# Altium schematic symbol library Resistor.SchLib: 1085 symbols (part 3 of 29)
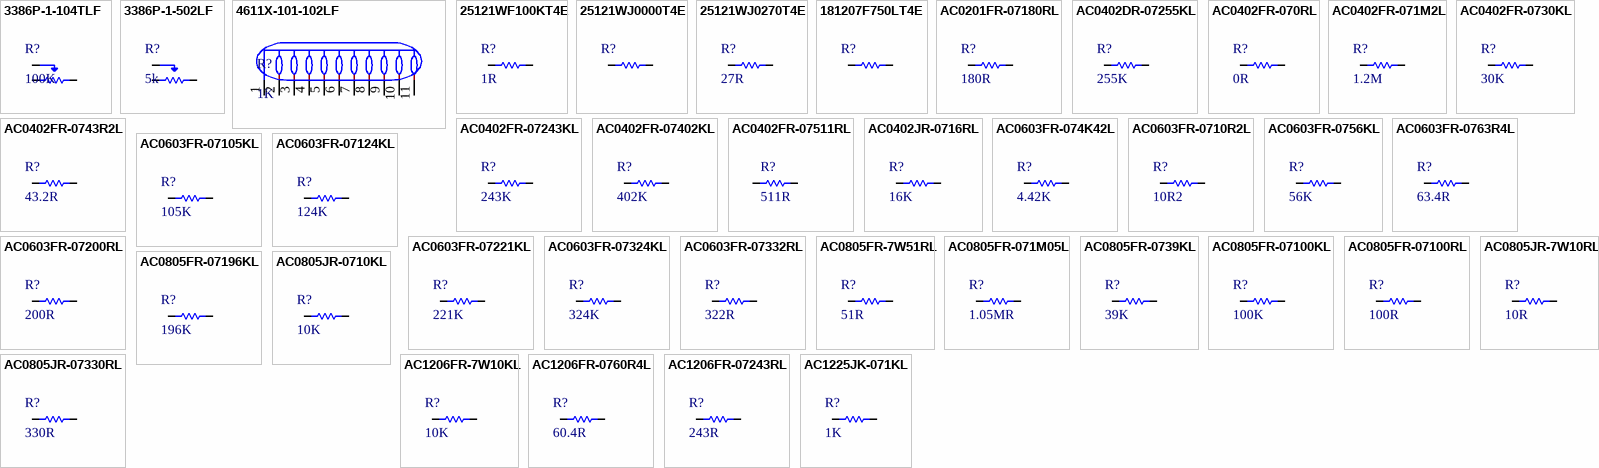
[diagram p29: symbols 3386P-1-104TLF to AC1225JK-071KL]

## AC0805FR-07196KL
designator R?, comment 196K
RES SMD 196K OHM 1% 1/8W 0805; Manufacturer: Yageo; Manufacturer Part Number: AC0805FR-07196KL; Value: 196kR; Max Power Dissipation: 125mW; Temperature Coefficient: 100ppm/°C; Item Type: Resistor; Supplier: Digi-Key; Supplier Part Number: AC0805FR-07196KL-ND; RoHS: Yes; Category: Chip SMD Resistors; Pricing: 5000=0.00699 (USD); Case/Package: 0805; Min Operating Temperature: -55°C; Max Operating Temperature: 155°C; Packaging: Tape and Reel; Number of Terminations: 2; Tolerance: 1%; Features: Moisture Resistant,Automotive AEC-Q200; Series: AC; Length: 0.079inch; Width: 0.049inch; Height: 0.024inch; RoHS Compliant: Yes; ComponentLink1URL: http://www.yageo.com/NewPortal/yageodocoutput?fileName=/pdf/R-Chip/PYu-AC_51_RoHS_L_6.pdf&src-supplier=Digi-Key; ComponentLink1Description: http://www.yageo.com/NewPortal/yageodocoutput?fileName=/pdf/R-Chip/PYu-AC_51_RoHS_L_6.pdf&src-supplier=Digi-Key; LCSC Part Number: C228360
footprint RES-0805 (SMD 0805)
pins: 1, 2

## AC0805JR-7W10RL
designator R?, comment 10R
RES 10 OHM 5% 1/4W 0805; Manufacturer: Yageo; Manufacturer Part Number: AC0805JR-7W10RL; Item Type: Resistors; Supplier: Future Electronics; LCSC Part Number: C728003; RoHS: Yes; Stock: 5000; Pricing: 5000=0.0117, 15000=0.0114, 25000=0.0113, 75000=0.011, 125000=0.0108 (USD); RoHS Compliant: Yes
footprint RES-0805 (SMD 0805)
pins: 1, 2

## AC0805JR-0710KL
designator R?, comment 10K
SMD Chip Resistor, 10 kOhm, ± 5%, 125 mW, 0805 [2012 Metric], Thick Film, General Purpose; Manufacturer: Yageo; Manufacturer Part Number: AC0805JR-0710KL; Power Rating: 125mW; Value: 10kR; Voltage Rating: 150V; Temperature Coefficient: 100ppm/°C; Supplier: Digikey; Supplier Part Number: YAG3758CT-ND; RoHS: Yes; Category: Chip SMD Resistors; Stock: 109979; Pricing: 1=0.1, 10=0.027, 50=0.0174, 100=0.0146, 500=0.01004, 1000=0.00868 (USD); Case/Package: 0805; Case Code (Imperial): 0805; Case Code (Metric): 2012; Min Operating Temperature: -55°C; Max Operating Temperature: 155°C; Termination: SMD/SMT; Packaging: Tape and Reel; Tolerance: 5%; Number of Terminations: 2; Max Power Dissipation: 125mW; Features: Moisture Resistant,Automotive AEC-Q200; Series: AC; Length: 0.079inch; Width: 1.25mm; Height: 0.024inch; Lead Free: Lead Free; RoHS Compliant: Yes; ComponentLink1URL: http://www.mouser.com/ds/2/447/yageodocoutput-1111992.pdf?src-supplier=Mouser; ComponentLink1Description: http://www.mouser.com/ds/2/447/yageodocoutput-1111992.pdf?src-supplier=Mouser; ComponentLink2URL: https://datasheet.octopart.com/AC0805JR-0710KL-Yageo-datasheet-151884373.pdf?src-supplier=Future+Electronics; ComponentLink2Description: https://datasheet.octopart.com/AC0805JR-0710KL-Yageo-datasheet-151884373.pdf?src-supplier=Future+Electronics; ComponentLink3URL: http://www.yageo.com/NewPortal/yageodocoutput?fileName=/pdf/R-Chip/PYu-AC_51_RoHS_L_6.pdf&src-supplier=Digikey; ComponentLink3Description: http://www.yageo.com/NewPortal/yageodocoutput?fileName=/pdf/R-Chip/PYu-AC_51_RoHS_L_6.pdf&src-supplier=Digikey; ComponentLink4URL: https://www.yageo.com/upload/media/product/productsearch/datasheet/rchip/PYu-AC_51_RoHS_L_7.pdf?src-supplier=Digikey; ComponentLink4Description: https://www.yageo.com/upload/media/product/productsearch/datasheet/rchip/PYu-AC_51_RoHS_L_7.pdf?src-supplier=Digikey; Item Type: Resistor; Package: 0805
footprint RES-0805 (SMD 0805)
pins: 1, 2

## AC0805JR-07330RL
designator R?, comment 330R
Res Thick Film 0805 330 Ohm 5% 0.125W(1/8W) ±100ppm/C Pad SMD Automotive T/R; Manufacturer: Yageo; Manufacturer Part Number: AC0805JR-07330RL; Power Rating: 125mW; Voltage Rating: 150V; Temperature Coefficient: 100ppm/°C; Item Type: Resistor; Supplier: Digikey; Supplier Part Number: YAG3783CT-ND; RoHS: Yes; Category: Chip SMD Resistors; Stock: 17646; Pricing: 1=0.1, 10=0.027, 50=0.0174, 100=0.0146, 500=0.01004, 1000=0.00868 (USD); Case/Package: 0805; Case Code (Imperial): 0805; Case Code (Metric): 2012; Weight: 0.000194oz; Min Operating Temperature: -55°C; Max Operating Temperature: 155°C; Value: 330R; Tolerance: 5%; Packaging: Tape and Reel; Number of Terminations: 2; Termination: SMD/SMT; Max Power Dissipation: 125mW; Features: Moisture Resistant,Automotive AEC-Q200; Series: AC; Length: 2mm; Width: 1.25mm; Height: 0.5mm; Ratings: AEC-Q200; RoHS Compliant: Yes; ComponentLink1URL: https://datasheet.ciiva.com/12576/pyu-ac-51-rohs-l-2-12576510.pdf?src-supplier=Mouser; ComponentLink1Description: https://datasheet.ciiva.com/12576/pyu-ac-51-rohs-l-2-12576510.pdf?src-supplier=Mouser; Package: 0805
footprint RES-0805 (SMD 0805)
pins: 1, 2

## AC1206FR-7W10KL
designator R?, comment 10K
RES 10K OHM 1% 1/2W 1206; Manufacturer: Yageo; Manufacturer Part Number: AC1206FR-7W10KL; Item Type: Resistors; Value: 10kR; Supplier: Mouser; LCSC Part Number: C326700; RoHS: No; Stock: 10222; Pricing: 1=0.14, 10=0.052, 50=0.052, 100=0.029, 1000=0.018, 10000=0.011 (USD); Case/Package: 340Case; Packaging: 10Packaging
footprint Res-1206
pins: 1, 2

## AC1206FR-0760R4L
designator R?, comment 60.4R
RES SMD 60.4 OHM 1% 1/4W 1206; Manufacturer: Yageo; Manufacturer Part Number: AC1206FR-0760R4L; Item Type: Resistors; Power Rating: 250mW; Voltage Rating: 200V; Temperature Coefficient: 100ppm/°C; Supplier: Future Electronics; LCSC Part Number: C144481; RoHS: Yes; Stock: 335000; Pricing: 5000=0.005, 20000=0.0048, 50000=0.0047, 125000=0.0045, 200000=0.0043 (USD); Case/Package: 1206; Case Code (Imperial): 1206; Case Code (Metric): 3216; Min Operating Temperature: -55°C; Max Operating Temperature: 155°C; Value: 60.4R; Tolerance: 1%; Packaging: Tape and Reel; Package Quantity: 1; Termination: SMD/SMT; Number of Terminations: 2; Max Power Dissipation: 250mW; Features: Moisture Resistant,Automotive AEC-Q200,Anti-Sulfur; Series: AC; Length: 0.122inch; Width: 0.063inch; Height: 0.026inch; Lead Free: Lead Free; RoHS Compliant: Yes; ComponentLink1URL: http://www.mouser.com/ds/2/447/yageodocoutput-1111992.pdf?src-supplier=Mouser; ComponentLink1Description: http://www.mouser.com/ds/2/447/yageodocoutput-1111992.pdf?src-supplier=Mouser; ComponentLink2URL: https://datasheet.octopart.com/AC1206FR-0760R4L-Yageo-datasheet-166720450.pdf?src-supplier=Future+Electronics; ComponentLink2Description: https://datasheet.octopart.com/AC1206FR-0760R4L-Yageo-datasheet-166720450.pdf?src-supplier=Future+Electronics; ComponentLink3URL: http://www.yageo.com/NewPortal/yageodocoutput?fileName=/pdf/R-Chip/PYu-AC_51_RoHS_L_6.pdf&src-supplier=Digikey; ComponentLink3Description: http://www.yageo.com/NewPortal/yageodocoutput?fileName=/pdf/R-Chip/PYu-AC_51_RoHS_L_6.pdf&src-supplier=Digikey; ComponentLink4URL: http://www.yageo.com/documents/recent/PYu-AC_51_RoHS_L_2_revised.pdf?src-supplier=Future+Electronics; ComponentLink4Description: http://www.yageo.com/documents/recent/PYu-AC_51_RoHS_L_2_revised.pdf?src-supplier=Future+Electronics
footprint Res-1206
pins: 1, 2

## AC1206FR-07243RL
designator R?, comment 243R
RES SMD 243 OHM 1% 1/4W 1206; Manufacturer: Yageo Group; Manufacturer Part Number: AC1206FR-07243RL; Item Type: Resistors; Max Power Dissipation: 250mW; Value: 243Ω; Temperature Coefficient: 100ppm/°C; Voltage Rating: 200V; Supplier: Mouser; LCSC Part Number: C229469; RoHS: Compliant; Stock: 80; Pricing: 1=0.1, 10=0.022, 50=0.022, 100=0.017, 1000=0.012, 10000=0.008 (USD); Case/Package: 1206; China RoHS: Non-Compliant; Composition: Thick Film; Features: Automotive AEC-Q200, Moisture Resistant; Height: 550µm; Length: 3.0988mm; Lifecycle Status: Production; Max Operating Temperature: 155°C; Min Operating Temperature: -55°C; Mounting Technology: Surface Mount; Number of Terminals: 2; Number of Terminations: 2; Packaging: Tape & Reel; Power Dissipation: 250mW; Power Rating: 250mW; REACH SVHC: Yes; Tolerance: 1%; Width: 1.6mm; Working Voltage: 200V; ComponentLink1URL: https://datasheet.octopart.com:443/AC1206FR-07243RL-Yageo-datasheet-182189377.pdf?src-supplier=IHS; ComponentLink1Description: https://datasheet.octopart.com:443/AC1206FR-07243RL-Yageo-datasheet-182189377.pdf?src-supplier=IHS; ComponentLink2URL: https://datasheet.octopart.com:443/AC1206FR-07243RL-Yageo-datasheet-86786639.pdf?src-supplier=Upverter; ComponentLink2Description: https://datasheet.octopart.com:443/AC1206FR-07243RL-Yageo-datasheet-86786639.pdf?src-supplier=Upverter; ComponentLink3URL: https://datasheet.octopart.com:443/AC1206FR-07243RL-Yageo-datasheet-178509465.pdf?src-supplier=Farnell; ComponentLink3Description: https://datasheet.octopart.com:443/AC1206FR-07243RL-Yageo-datasheet-178509465.pdf?src-supplier=Farnell; ComponentLink4URL: https://datasheet.octopart.com:443/AC1206FR-07243RL-Yageo-datasheet-166720450.pdf?src-supplier=Future+Electronics; ComponentLink4Description: https://datasheet.octopart.com:443/AC1206FR-07243RL-Yageo-datasheet-166720450.pdf?src-supplier=Future+Electronics; ComponentLink5URL: https://datasheet.octopart.com:443/AC1206FR-07243RL-Yageo-datasheet-151884373.pdf?src-supplier=Future+Electronics; ComponentLink5Description: https://datasheet.octopart.com:443/AC1206FR-07243RL-Yageo-datasheet-151884373.pdf?src-supplier=Future+Electronics; ComponentLink6URL: https://datasheet.octopart.com:443/AC1206FR-07243RL-Yageo-datasheet-137699919.pdf?src-supplier=Future+Electronics; ComponentLink6Description: https://datasheet.octopart.com:443/AC1206FR-07243RL-Yageo-datasheet-137699919.pdf?src-supplier=Future+Electronics; ComponentLink7URL: https://datasheet.octopart.com/AC1206FR-07243RL-Yageo-datasheet-12512238.pdf; ComponentLink7Description: https://datasheet.octopart.com/AC1206FR-07243RL-Yageo-datasheet-12512238.pdf; ComponentLink8URL: http://sigma.octopart.com:80/rohs_statement/Yageo-company-2.pdf?src-supplier=Compliance+Statements; ComponentLink8Description: http://sigma.octopart.com:80/rohs_statement/Yageo-company-2.pdf?src-supplier=Compliance+Statements; ComponentLink9URL: http://sigma.octopart.com:80/conflict_mineral_statement/Yageo-company-3.pdf?src-supplier=Compliance+Statements; ComponentLink9Description: http://sigma.octopart.com:80/conflict_mineral_statement/Yageo-company-3.pdf?src-supplier=Compliance+Statements
footprint Res-1206
pins: 1, 2

## AC1225JK-071KL
designator R?, comment 1K
RES 1K OHM 5% 2W 1225; Manufacturer: Yageo; Manufacturer Part Number: AC1225JK-071KL; Item Type: Resistors; Supplier: Digikey; LCSC Part Number: C3001870; RoHS: Yes; Pricing: 4000=0.17137 (USD); RoHS Compliant: Yes
footprint Res 1225
pins: 1, 2

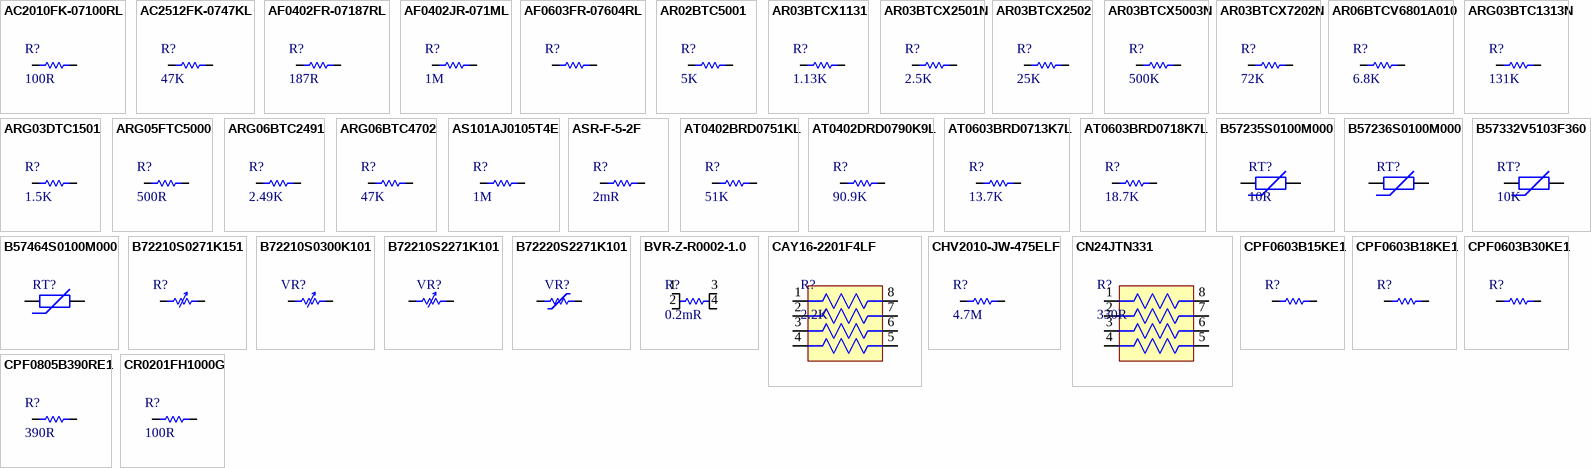
[diagram p4: symbols AC2010FK-07100RL to CR0201FH1000G]

## AC2010FK-07100RL
designator R?, comment 100R
RES SMD 100 OHM 1% 3/4W 2010; Manufacturer: Yageo; Manufacturer Part Number: AC2010FK-07100RL; Item Type: Resistors; Max Power Dissipation: 750mW; Temperature Coefficient: 100ppm/°C; Supplier: Future Electronics; LCSC Part Number: C138240; RoHS: Yes; Stock: 4000; Pricing: 4000=0.0203, 12000=0.0198, 20000=0.0196, 40000=0.0193, 80000=0.0188 (USD); Case/Package: 2010; Case Code (Metric): 5025; Case Code (Imperial): 2010; Min Operating Temperature: -55°C; Max Operating Temperature: 155°C; Packaging: Cut Tape; Value: 100R; Number of Terminations: 2; Tolerance: 1%; Features: Moisture Resistant,Automotive AEC-Q200; Series: AC; Ratings: AEC-Q200; RoHS Compliant: Yes; ComponentLink1URL: https://www.yageo.com/upload/media/product/productsearch/datasheet/rchip/PYu-AC_51_RoHS_L_7.pdf?src-supplier=Digikey; ComponentLink1Description: https://www.yageo.com/upload/media/product/productsearch/datasheet/rchip/PYu-AC_51_RoHS_L_7.pdf?src-supplier=Digikey
footprint RES-2010
pins: 1, 2

## AC2512FK-0747KL
designator R?, comment 47K
RES SMD 47K OHM 1% 1W 2512; Manufacturer: Yageo; Manufacturer Part Number: AC2512FK-0747KL; Item Type: Resistors; Value: 47kR; Temperature Coefficient: 100ppm/°C; Voltage Rating: 200V; Supplier: Digikey; LCSC Part Number: C728203; RoHS: Yes; Stock: 7724; Pricing: 1=0.59, 10=0.197, 100=0.1907, 1000=0.18462 (USD); Case/Package: 2512; Min Operating Temperature: -55°C; Max Operating Temperature: 155°C; Packaging: Tape and Reel; Number of Terminations: 2; Tolerance: 1%; Max Power Dissipation: 1W; Features: Moisture Resistant,Automotive AEC-Q200; Series: AC; Length: 0.25inch; Width: 0.122inch; Height: 0.026inch; RoHS Compliant: Yes; ComponentLink1URL: http://www.yageo.com/NewPortal/yageodocoutput?fileName=/pdf/R-Chip/PYu-AC_51_RoHS_L_5.pdf&src-supplier=Digikey; ComponentLink1Description: http://www.yageo.com/NewPortal/yageodocoutput?fileName=/pdf/R-Chip/PYu-AC_51_RoHS_L_5.pdf&src-supplier=Digikey; ComponentLink2URL: http://www.yageo.com/NewPortal/yageodocoutput?fileName=/pdf/R-Chip/PYu-AC_51_RoHS_L_6.pdf&src-supplier=Digikey; ComponentLink2Description: http://www.yageo.com/NewPortal/yageodocoutput?fileName=/pdf/R-Chip/PYu-AC_51_RoHS_L_6.pdf&src-supplier=Digikey; ComponentLink3URL: https://www.yageo.com/upload/media/product/productsearch/datasheet/rchip/PYu-AC_51_RoHS_L_7.pdf?src-supplier=Digikey; ComponentLink3Description: https://www.yageo.com/upload/media/product/productsearch/datasheet/rchip/PYu-AC_51_RoHS_L_7.pdf?src-supplier=Digikey
footprint RES-2512
pins: 1, 2

## AF0402FR-07187RL
designator R?, comment 187R
RES 187 OHM 1% 1/16W 0402; Manufacturer: Yageo; Manufacturer Part Number: AF0402FR-07187RL; Item Type: Resistors; Supplier: Future Electronics; LCSC Part Number: C6123659; RoHS: No; Stock: 10000; Pricing: 10000=0.0056, 40000=0.0054, 150000=0.0052, 400000=0.0051, 1000000=0.0049 (USD)
footprint Res-0402
pins: 1, 2

## AF0402JR-071ML
designator R?, comment 1M
RES SMD 1M OHM 5% 1/16W 0402; Manufacturer: Yageo; Manufacturer Part Number: AF0402JR-071ML; Resistance: 1MR; Max Power Dissipation: 63mW; Temperature Coefficient: 100ppm/°C; Item Type: Resistor; Supplier 1: Digi-Key; Stock 1: 0; Pricing 1: 10000=0.00408 (USD); Case/Package: 0402; Min Operating Temperature: -55°C; Max Operating Temperature: 155°C; Packaging: Tape and Reel; Resistor Type: Thick Film; Number of Terminations: 2; Tolerance: 5%; Features: Moisture Resistant,Anti-Sulfur; Length: 0.039inch; Width: 0.02inch; Height: 0.015inch; RoHS Compliant: Yes; ComponentLink1URL: https://www.yageo.com/upload/media/product/productsearch/datasheet/rchip/PYu-AF_51_RoHS_L_6.pdf?src-supplier=Digi-Key; ComponentLink1Description: https://www.yageo.com/upload/media/product/productsearch/datasheet/rchip/PYu-AF_51_RoHS_L_6.pdf?src-supplier=Digi-Key; Supplier Part Number 1: AF0402JR-071ML-ND; LCSC Part Number: C144054
footprint Res-0402
pins: 1, 2

## AF0603FR-07604RL
designator R?
RES 604 OHM 1% 1/10W 0603; Manufacturer: Yageo; Manufacturer Part Number: AF0603FR-07604RL; Item Type: Resistor; Supplier: Future Electronics; LCSC Part Number: C5549529; RoHS: No; Stock: 35000; Pricing: 5000=0.0032, 25000=0.003, 125000=0.0029, 500000=0.0027, 1250000=0.0025 (USD)
footprint Res-0603
pins: 1, 2

## AR02BTC5001
designator R?, comment 5K
63mW Thin Film Resistor ±25ppm/℃ ±0.1% 5kΩ 0402 Chip Resistor - Surface Mount ROHS; Manufacturer: Viking Tech; Manufacturer Part Number: AR02BTC5001; Package: 0402; LCSC Part Number: C5948099; Item Type: Resistor; ComponentLink1Description: LCSC; ComponentLink1URL: https://www.lcsc.com/product-detail/Chip-Resistor-Surface-Mount_Viking-Tech-AR02BTC5001_C5948099.html
footprint Res-0402
pins: 1, 2

## AR03BTCX1131
designator R?, comment 1.13K
Thin Film Resistor ±25ppm/℃ ±0.1% 1.13kΩ 0603 Chip Resistor - Surface Mount ROHS; Manufacturer: Viking Tech; Manufacturer Part Number: AR03BTCX1131; Package: 0603; LCSC Part Number: C2984318; Item Type: Resistor; ComponentLink1Description: LCSC; ComponentLink1URL: https://www.lcsc.com/product-detail/Chip-Resistor-Surface-Mount_Viking-Tech-AR03BTCX1131_C2984318.html
footprint Res-0603
pins: 1, 2

## AR03BTCX2501N
designator R?, comment 2.5K
±0.1% 2.5kΩ 0603 Chip Resistor - Surface Mount ROHS; Manufacturer: Viking Tech; Manufacturer Part Number: AR03BTCX2501N; Package: 0603; LCSC Part Number: C3013546; Item Type: Resistor; ComponentLink1Description: LCSC; ComponentLink1URL: https://www.lcsc.com/product-detail/Chip-Resistor-Surface-Mount_Viking-Tech-AR03BTCX2501N_C3013546.html
footprint Res-0603
pins: 1, 2

## AR03BTCX2502
designator R?, comment 25K
100mW Thin Film Resistor 50V ±25ppm/℃ ±0.1% 25kΩ 0603 Chip Resistor - Surface Mount ROHS; Manufacturer: Viking Tech; Manufacturer Part Number: AR03BTCX2502; Package: 0603; LCSC Part Number: C2828637; Item Type: Resistor; ComponentLink1Description: LCSC; ComponentLink1URL: https://www.lcsc.com/product-detail/Chip-Resistor-Surface-Mount_Viking-Tech-AR03BTCX2502_C2828637.html
footprint Res-0603
pins: 1, 2

## AR03BTCX5003N
designator R?, comment 500K
100mW Thin Film Resistor 50V ±25ppm/℃ ±0.1% 500kΩ 0603 Chip Resistor - Surface Mount ROHS; Manufacturer: Viking Tech; Manufacturer Part Number: AR03BTCX5003N; Package: 0603; LCSC Part Number: C2902631; Item Type: Resistor; ComponentLink1Description: LCSC; ComponentLink1URL: https://www.lcsc.com/product-detail/Chip-Resistor-Surface-Mount_Viking-Tech-AR03BTCX5003N_C2902631.html
footprint Res-0603
pins: 1, 2

## AR03BTCX7202N
designator R?, comment 72K
62.5mW Thin Film Resistor 50V ±25ppm/℃ ±0.1% 72kΩ 0603 Chip Resistor - Surface Mount ROHS; Manufacturer: Viking Tech; Manufacturer Part Number: AR03BTCX7202N; Package: 0603; LCSC Part Number: C2828635; Item Type: Resistor; ComponentLink1Description: LCSC; ComponentLink1URL: https://www.lcsc.com/product-detail/Chip-Resistor-Surface-Mount_Viking-Tech-AR03BTCX7202N_C2828635.html
footprint Res-0603
pins: 1, 2

## AR06BTCV6801A010
designator R?, comment 6.8K
250mW Thin Film Resistor 150V ±25ppm/℃ ±0.1% 6.8kΩ 1206 Chip Resistor - Surface Mount ROHS; Manufacturer: Viking Tech; Manufacturer Part Number: AR06BTCV6801A010; Package: 1206; LCSC Part Number: C374801; Item Type: Resistor; ComponentLink1Description: LCSC; ComponentLink1URL: https://www.lcsc.com/product-detail/Chip-Resistor-Surface-Mount_Viking-Tech-AR06BTCV6801A010_C374801.html
footprint Res-1206
pins: 1, 2

## ARG03BTC1313N
designator R?, comment 131K
100mW Thin Film Resistor 75V ±25ppm/℃ ±0.1% 131kΩ 0603 Chip Resistor - Surface Mount ROHS; Manufacturer: Viking Tech; Manufacturer Part Number: ARG03BTC1313N; Package: 0603; LCSC Part Number: C1509630; Item Type: Resistor; ComponentLink1Description: LCSC; ComponentLink1URL: https://www.lcsc.com/product-detail/Chip-Resistor-Surface-Mount_Viking-Tech-ARG03BTC1313N_C1509630.html
footprint Res-0603
pins: 1, 2

## ARG03DTC1501
designator R?, comment 1.5K
100mW Thin Film Resistor 75V ±0.5% ±25ppm/℃ 1.5kΩ 0603 Chip Resistor - Surface Mount ROHS; Manufacturer: Viking Tech; Manufacturer Part Number: ARG03DTC1501; Package: 0603; LCSC Part Number: C311910; Item Type: Resistor; ComponentLink1Description: LCSC; ComponentLink1URL: https://www.lcsc.com/product-detail/Chip-Resistor-Surface-Mount_Viking-Tech-ARG03DTC1501_C311910.html
footprint Res-0603
pins: 1, 2

## ARG05FTC5000
designator R?, comment 500R
125mW Thin Film Resistor 150V ±25ppm/℃ ±1% 500Ω 0805 Chip Resistor - Surface Mount ROHS; Manufacturer: Viking Tech; Manufacturer Part Number: ARG05FTC5000; Package: 0805; LCSC Part Number: C2828857; Item Type: Resistor; ComponentLink1Description: LCSC; ComponentLink1URL: https://www.lcsc.com/product-detail/Chip-Resistor-Surface-Mount_Viking-Tech-ARG05FTC5000_C2828857.html
footprint RES-0805 (SMD 0805)
pins: 1, 2

## ARG06BTC2491
designator R?, comment 2.49K
250mW 200V ±25ppm/℃ ±0.1% 2.49kΩ 1206 Chip Resistor - Surface Mount ROHS; Manufacturer: Viking Tech; Manufacturer Part Number: ARG06BTC2491; Package: 1206; LCSC Part Number: C5122072; Item Type: Resistor; ComponentLink1Description: LCSC; ComponentLink1URL: https://www.lcsc.com/product-detail/Chip-Resistor-Surface-Mount_Viking-Tech-ARG06BTC2491_C5122072.html
footprint Res-1206
pins: 1, 2

## ARG06BTC4702
designator R?, comment 47K
250mW Thin Film Resistor 200V ±25ppm/℃ ±0.1% 47kΩ 1206 Chip Resistor - Surface Mount ROHS; Manufacturer: Viking Tech; Manufacturer Part Number: ARG06BTC4702; Package: 1206; LCSC Part Number: C2828891; Item Type: Resistor; ComponentLink1Description: LCSC; ComponentLink1URL: https://www.lcsc.com/product-detail/Chip-Resistor-Surface-Mount_Viking-Tech-ARG06BTC4702_C2828891.html
footprint Res-1206
pins: 1, 2

## AS101AJ0105T4E
designator R?, comment 1M
1.5W Thick Film Resistors 400V ±100ppm/℃ ±5% 1MΩ 2010 Chip Resistor - Surface Mount ROHS; Manufacturer: UNI-ROYAL(Uniroyal Elec); Manufacturer Part Number: AS101AJ0105T4E; Package: 2010; LCSC Part Number: C965991; Item Type: Resistor; ComponentLink1Description: LCSC; ComponentLink1URL: https://www.lcsc.com/product-detail/Chip-Resistor-Surface-Mount_UNI-ROYAL-Uniroyal-Elec-AS101AJ0105T4E_C965991.html
footprint RES-2010
pins: 1, 2

## ASR-F-5-2F
designator R?, comment 2mR
6W 2mΩ Surface Mount Shunt ±50ppm/℃ ±1% 3920 Current Sense Resistors / Shunt Resistors ROHS; Manufacturer: Shenzhen Yezhan Elec; Manufacturer Part Number: ASR-F-5-2F; Package: 3920; LCSC Part Number: C469436; Item Type: Resistors; ComponentLink1Description: LCSC; ComponentLink1URL: https://www.lcsc.com/product-detail/Current-Sense-Resistors-Shunt-Resistors_Shenzhen-Yezhan-Elec-ASR-F-5-2F_C469436.html
footprint RES 3920
pins: 1, 2

## AT0402BRD0751KL
designator R?, comment 51K
RES 51K OHM 0.1% 1/16W 0402; Manufacturer: Yageo; Manufacturer Part Number: AT0402BRD0751KL; Item Type: Resistor; Supplier: Digikey; Supplier Part Number: 13-AT0402BRD0751KLTR-ND; RoHS: Yes; Pricing: 10000=0.08359 (USD); LCSC Part Number: C5455493
footprint Res-0402
pins: 1, 2

## AT0402DRD0790K9L
designator R?, comment 90.9K
RES SMD 90.9KOHM 0.5% 1/16W 0402; Manufacturer: Yageo; Manufacturer Part Number: AT0402DRD0790K9L; Item Type: Resistor; Value: 90.9kR; Max Power Dissipation: 63mW; Temperature Coefficient: 25ppm/°C; Supplier: Digikey; LCSC Part Number: C851529; RoHS: Yes; Pricing: 10000=0.03114 (USD); Case/Package: 0402; Min Operating Temperature: -55°C; Max Operating Temperature: 155°C; Packaging: Tape and Reel; Number of Terminations: 2; Tolerance: 0.5%; Features: Moisture Resistant,Automotive AEC-Q200,Anti-Sulfur; Series: AT; Length: 0.039inch; Width: 0.02inch; Height: 0.014inch; RoHS Compliant: Yes; ComponentLink1URL: http://www.yageo.com/documents/recent/PYu-AT_51_RoHS_L-3.pdf?src-supplier=Digikey; ComponentLink1Description: http://www.yageo.com/documents/recent/PYu-AT_51_RoHS_L-3.pdf?src-supplier=Digikey
footprint Res-0402
pins: 1, 2

## AT0603BRD0713K7L
designator R?, comment 13.7K
RES SMD 13.7KOHM 0.1% 1/10W 0603; Manufacturer: Yageo; Manufacturer Part Number: AT0603BRD0713K7L; Value: 13.7kR; Max Power Dissipation: 100mW; Temperature Coefficient: 25ppm/°C; Item Type: Resistor; Supplier: Mouser; Supplier Part Number: 603-AT0603BRD0713K7L; RoHS: Yes; Category: Chip SMD Resistors; Stock: 2500; Pricing: 1=0.52, 10=0.396, 50=0.396, 100=0.167, 1000=0.092, 10000=0.075 (USD); Case/Package: 0603; Min Operating Temperature: -55°C; Max Operating Temperature: 155°C; Packaging: Tape and Reel; Number of Terminations: 2; Tolerance: 0.1%; Features: Moisture Resistant,Automotive AEC-Q200,Anti-Sulfur; Series: AT; Length: 0.063inch; Width: 0.032inch; Height: 0.022inch; RoHS Compliant: Yes; ComponentLink1URL: http://www.yageo.com/documents/recent/PYu-AT_51_RoHS_L-3.pdf?src-supplier=Digi-Key; ComponentLink1Description: http://www.yageo.com/documents/recent/PYu-AT_51_RoHS_L-3.pdf?src-supplier=Digi-Key; LCSC Part Number: C855608
footprint Res-0603
pins: 1, 2

## AT0603BRD0718K7L
designator R?, comment 18.7K
RES SMD 18.7KOHM 0.1% 1/10W 0603; Manufacturer: Yageo; Manufacturer Part Number: AT0603BRD0718K7L; Item Type: Resistors; Voltage Rating: 75V; Supplier: Digikey; LCSC Part Number: C855662; RoHS: Yes; Stock: 9940; Pricing: 1=0.29, 10=0.205, 50=0.1606, 100=0.1438, 500=0.10968, 1000=0.09691 (USD); ComponentLink1URL: https://datasheet.octopart.com/AT0603BRD0718K7L-Yageo-datasheet-137700080.pdf?src-supplier=Future+Electronics; ComponentLink1Description: https://datasheet.octopart.com/AT0603BRD0718K7L-Yageo-datasheet-137700080.pdf?src-supplier=Future+Electronics; ComponentLink2URL: http://www.yageo.com/documents/recent/PYu-AT_51_RoHS_L-3.pdf?src-supplier=Digikey; ComponentLink2Description: http://www.yageo.com/documents/recent/PYu-AT_51_RoHS_L-3.pdf?src-supplier=Digikey; ComponentLink3URL: https://datasheet.octopart.com/AT0603BRD0718K7L-Yageo-datasheet-178056449.pdf?src-supplier=Farnell; ComponentLink3Description: https://datasheet.octopart.com/AT0603BRD0718K7L-Yageo-datasheet-178056449.pdf?src-supplier=Farnell
footprint Res-0603
pins: 1, 2

## B57235S0100M000
designator RT?, comment 10R
ICL 10 OHM 20% 3A 9.5MM; Manufacturer: TDK EPCOS; Manufacturer Part Number: B57235S0100M000; Item Type: Thermistors; Supplier: Digikey; LCSC Part Number: C125456; RoHS: Yes; Stock: 17669; Pricing: 1=0.67, 5=0.646, 10=0.627, 50=0.5274, 100=0.4378, 250=0.398, 500=0.33828, 1000=0.29848, 5000=0.27638 (USD); ComponentLink1URL: https://datasheet.ciiva.com/15097/getdatasheetpartid-382136-15097842.pdf?src-supplier=Verical; ComponentLink1Description: https://datasheet.ciiva.com/15097/getdatasheetpartid-382136-15097842.pdf?src-supplier=Verical; ComponentLink2URL: https://datasheet.ciiva.com/29386/419728-da-01-en-ntc-sensor-b57235s0100m000-29386966.pdf?src-supplier=Conrad; ComponentLink2Description: https://datasheet.ciiva.com/29386/419728-da-01-en-ntc-sensor-b57235s0100m000-29386966.pdf?src-supplier=Conrad; ComponentLink3URL: https://datasheet.ciiva.com/48779/1899134-48779789.pdf?src-supplier=Element14; ComponentLink3Description: https://datasheet.ciiva.com/48779/1899134-48779789.pdf?src-supplier=Element14
footprint B57235S0100M000
pins: 1, 2

## B57236S0100M000
designator RT?
ICL 10 OHM 20% 3.5A 11.5MM; Manufacturer: TDK EPCOS; Manufacturer Part Number: B57236S0100M000; Item Type: Thermistors; Supplier: Mouser; LCSC Part Number: C125458; RoHS: Yes; Stock: 2235; Pricing: 1=0.84, 10=0.78, 50=0.646, 100=0.572, 1000=0.44, 10000=0.373 (USD); Current Rating: 3.5A; Tolerance: 20%; Diameter: 11.5mm; Thickness: 6mm; Lead Free: 5697LeadFree; ComponentLink1URL: https://datasheet.ciiva.com/15097/getdatasheetpartid-119550-15097692.pdf?src-supplier=Verical; ComponentLink1Description: https://datasheet.ciiva.com/15097/getdatasheetpartid-119550-15097692.pdf?src-supplier=Verical; ComponentLink2URL: https://datasheet.ciiva.com/1321/1851770-1321676.pdf?src-supplier=Element14; ComponentLink2Description: https://datasheet.ciiva.com/1321/1851770-1321676.pdf?src-supplier=Element14
footprint B57236S0100M000
pins: 1, 2

## B57332V5103F360
designator RT?, comment 10K
THERMISTOR NTC 10KOHM 3380K 0603; Manufacturer: TDK EPCOS; Manufacturer Part Number: B57332V5103F360; Value: 10kR; Power Rating: 180mW; Tolerance: 1%; Item Type: NTC Thermistor; Supplier: Rs; Supplier Part Number: 8807288P; RoHS: Yes; Category: Thermistors; Stock: 178550; Pricing: 250=0.085 (GBP); Mounting Technology: Surface Mount; Case/Package: 0603; Pins: 2; Case Code (Metric): 1608; Case Code (Imperial): 0603; Contact Plating: Tin; Min Operating Temperature: -40°C; Max Operating Temperature: 150°C; Packaging: Tape and Reel; Package Quantity: 4000; Max Power Dissipation: 180mW; Termination: SMD/SMT; Series: B573; Resistance Tolerance: 1%; Length: 1.6mm; Width: 0.8mm; Height: 0.9mm; Depth: 0.8mm; Radiation Hardening: No; Reach SVHC Compliant: No; RoHS Compliant: Yes; ComponentLink1URL: https://datasheet.ciiva.com/26930/getdatasheetpartid-777571-26930642.pdf?src-supplier=Verical; ComponentLink1Description: https://datasheet.ciiva.com/26930/getdatasheetpartid-777571-26930642.pdf?src-supplier=Verical; ComponentLink2URL: https://datasheet.ciiva.com/46435/1835850-46435735.pdf?src-supplier=Element14; ComponentLink2Description: https://datasheet.ciiva.com/46435/1835850-46435735.pdf?src-supplier=Element14; LCSC Part Number: C209893
footprint Res-0603
pins: 1, 2

## B57464S0100M000
designator RT?
ICL 10 OHM 20% 8A 26MM; Manufacturer: TDK EPCOS; Manufacturer Part Number: B57464S0100M000; Item Type: THermistor; Supplier: Digikey; Supplier Part Number: 495-4111-ND; RoHS: Yes; Pricing: 1=5.3, 5=4.42, 10=4.087, 50=3.4022, 200=2.9015, 400=2.6778, 600=2.5544, 1000=2.50812 (USD); ComponentLink1URL: https://datasheet.ciiva.com/46435/1795241-46435759.pdf?src-supplier=Element14; ComponentLink1Description: https://datasheet.ciiva.com/46435/1795241-46435759.pdf?src-supplier=Element14; ComponentLink2URL: https://datasheet.ciiva.com/7982/1795241-7982525.pdf?src-supplier=Element14; ComponentLink2Description: https://datasheet.ciiva.com/7982/1795241-7982525.pdf?src-supplier=Element14
footprint B57464S0100M000
pins: 1, 2

## B72210S0271K151
designator R?
VARISTOR 430V 2.5KA DISC 10MM; Manufacturer: TDK EPCOS; Manufacturer Part Number: B72210S0271K151; Item Type: Varistors; Energy: 43J; Number of Circuits: 1; Max Voltage Rating (AC): 275V; Max Voltage Rating (DC): 350V; Min Varistor Voltage: 387V; Max Varistor Voltage: 473V; Value: 195pF; Current Rating: 25A; Tolerance: 10%; Clamping Voltage: 710V; Lead/Base Style: Radial; Supplier: Arrow Electronics; LCSC Part Number: C125512; RoHS: Yes; Stock: 4000; Pricing: 1000=0.124 (USD); Mounting Technology: Through Hole; Case/Package: Metal; Min Operating Temperature: -40°C; Max Operating Temperature: 85°C; Varistor Voltage: 430V; Series: Standard; Packaging: Tape and Reel; Package Quantity: 1000; Max Surge Current: 2.5kA; Voltage Rating (DC): 350V; Voltage Rating (AC): 275V; Termination: Radial; Clamping Current: 25A; Diameter: 12mm; Length: 12mm; Width: 5mm; Height: 14.5mm; Lead Pitch: 7.5mm; Depth: 5mm; Radiation Hardening: No; Reach SVHC Compliant: No; RoHS Compliant: Yes; ComponentLink1URL: https://datasheet.ciiva.com/12350/siov-leaded-standard-12350934.pdf?src-supplier=Mouser; ComponentLink1Description: https://datasheet.ciiva.com/12350/siov-leaded-standard-12350934.pdf?src-supplier=Mouser; ComponentLink2URL: https://datasheet.ciiva.com/15155/getdatasheetpartid-382537-15155911.pdf?src-supplier=Verical; ComponentLink2Description: https://datasheet.ciiva.com/15155/getdatasheetpartid-382537-15155911.pdf?src-supplier=Verical
footprint B72210S0271K151
pins: 1, 2

## B72210S0300K101
designator VR?
VARISTOR 47V 500A DISC 10MM; Manufacturer: TDK EPCOS; Manufacturer Part Number: B72210S0300K101; Voltage Rating (DC): 38V; Voltage Rating (AC): 30V; Value: 2.75nF; Clamping Voltage: 93V; Clamping Current: 5A; Energy: 4.4J; Lead/Base Style: Radial; Tolerance: 10%; Number of Circuits: 1; Min Varistor Voltage: 42.3V; Max Varistor Voltage: 51.7V; Lead Length: 30mm; Supplier 1: Arrow Electronics; RoHS: Yes; Category: Varistors; Stock 1: 14838; Pricing 1: 1=0.3862, 10=0.3035, 25=0.3004, 100=0.2152, 250=0.215, 500=0.1646, 1000=0.1301, 2500=0.1213, 5000=0.1048 (USD); Mounting Technology: Through Hole,Radial; Min Operating Temperature: -40°C; Max Operating Temperature: 85°C; Max Surge Current: 500A; Packaging: Bulk; Max Voltage Rating (DC): 38V; Max Voltage Rating (AC): 30V; Varistor Voltage: 47V; Series: Standard; Package Quantity: 500; Diameter: 10mm; Lead Pitch: 7.5mm; Depth: 4.4mm; Thickness: 4.4mm; Reach SVHC Compliant: No; RoHS Compliant: Yes; ComponentLink1URL: https://datasheet.ciiva.com/11834/0900766b80188ddb-11834267.pdf?src-supplier=Rs; ComponentLink1Description: https://datasheet.ciiva.com/11834/0900766b80188ddb-11834267.pdf?src-supplier=Rs; ComponentLink2URL: https://datasheet.ciiva.com/15155/getdatasheetpartid-111496-15155493.pdf?src-supplier=Verical; ComponentLink2Description: https://datasheet.ciiva.com/15155/getdatasheetpartid-111496-15155493.pdf?src-supplier=Verical; ComponentLink3URL: https://datasheet.ciiva.com/1277/1899727-1277935.pdf?src-supplier=Element14; ComponentLink3Description: https://datasheet.ciiva.com/1277/1899727-1277935.pdf?src-supplier=Element14; Supplier Part Number 1: B72210S0300K101; LCSC Part Number: C125513; Item Type: Varistor
footprint B72210S0300K101
pins: 1, 2

## B72210S2271K101
designator VR?
VARISTOR 430V 3.5KA DISC 10MM; Manufacturer: TDK EPCOS; Manufacturer Part Number: B72210S2271K101; Item Type: Varistors; Value: 195pF; Number of Circuits: 1; Max Voltage Rating (AC): 275V; Max Voltage Rating (DC): 350V; Energy: 55J; Min Varistor Voltage: 387V; Max Varistor Voltage: 473V; Clamping Current: 25A; Clamping Voltage: 710V; Lead/Base Style: Radial; Voltage Tolerance: 10%; Power Rating: 400mW; ESD Protection: 5898YesNo; Supplier: Avnet; LCSC Part Number: C210564; RoHS: Yes; Stock: 5700; Pricing: 1=0.12365, 10=0.12192, 30=0.12018, 50=0.11845, 100=0.11671 (USD); Mounting Technology: Through Hole; Case/Package: Radial; Contact Plating: 154ConductorMaterial; Weight: 2.000002g; Material: 4240ConductorMaterial; Min Operating Temperature: -40°C; Max Operating Temperature: 85°C; Packaging: Bulk; Varistor Voltage: 430V; Max Surge Current: 3.5kA; Series: AdvanceD; Voltage Rating: 350V; Voltage Rating (AC): 275V; Voltage Rating (DC): 350V; Termination: 4745ConnectorType; Tolerance: 10%; Current Rating: 25A; Diameter: 12mm; Height: 14.5mm; Lead Pitch: 7.5mm; Depth: 5.4mm; Radiation Hardening: 5898YesNo; RoHS Compliant: Yes; Reach SVHC Compliant: Unknown; Flammability Rating: 5813Flammability; ComponentLink1URL: http://www.farnell.com/datasheets/1680955.pdf?src-supplier=Farnell; ComponentLink1Description: http://www.farnell.com/datasheets/1680955.pdf?src-supplier=Farnell; ComponentLink2URL: http://www.farnell.com/datasheets/2311597.pdf?src-supplier=Farnell; ComponentLink2Description: http://www.farnell.com/datasheets/2311597.pdf?src-supplier=Farnell; ComponentLink3URL: http://components.arrow.com/part/dataview/30869957S9461734N9769?src-supplier=Arrow+Electronics; ComponentLink3Description: http://components.arrow.com/part/dataview/30869957S9461734N9769?src-supplier=Arrow+Electronics; ComponentLink4URL: http://www.farnell.com/datasheets/1680955.pdf?src-supplier=Element14; ComponentLink4Description: http://www.farnell.com/datasheets/1680955.pdf?src-supplier=Element14; ComponentLink5URL: http://www.farnell.com/datasheets/2311597.pdf?src-supplier=Newark; ComponentLink5Description: http://www.farnell.com/datasheets/2311597.pdf?src-supplier=Newark; ComponentLink6URL: http://datasheet.octopart.com/B72210S2271K101-EPCOS-datasheet-11546246.pdf?src-supplier=Distrelec; ComponentLink6Description: http://datasheet.octopart.com/B72210S2271K101-EPCOS-datasheet-11546246.pdf?src-supplier=Distrelec; ComponentLink7URL: https://en.tdk.eu/inf/70/db/var/SIOV_Leaded_AdvanceD.pdf?src-supplier=Digikey; ComponentLink7Description: https://en.tdk.eu/inf/70/db/var/SIOV_Leaded_AdvanceD.pdf?src-supplier=Digikey; ComponentLink8URL: https://datasheet.octopart.com/S10K275E2-EPCOS-datasheet-5104.pdf?src-supplier=Future+Electronics; ComponentLink8Description: https://datasheet.octopart.com/S10K275E2-EPCOS-datasheet-5104.pdf?src-supplier=Future+Electronics; ComponentLink9URL: http://datasheet.octopart.com/B72210S2271K101-EPCOS-datasheet-11546246.pdf?src-supplier=Mouser; ComponentLink9Description: http://datasheet.octopart.com/B72210S2271K101-EPCOS-datasheet-11546246.pdf?src-supplier=Mouser; ComponentLink10URL: https://datasheet.octopart.com/B72210S2271K101-EPCOS-datasheet-11546246.pdf?src-supplier=Newark; ComponentLink10Description: https://datasheet.octopart.com/B72210S2271K101-EPCOS-datasheet-11546246.pdf?src-supplier=Newark; ComponentLink11URL: http://datasheet.octopart.com/B72210S2271K101-EPCOS-datasheet-11546246.pdf?src-supplier=Avnet; ComponentLink11Description: http://datasheet.octopart.com/B72210S2271K101-EPCOS-datasheet-11546246.pdf?src-supplier=Avnet; ComponentLink12URL: http://www.epcos.com/inf/70/db/var_08/SIOV_Leaded_StandarD.pdf?src-supplier=Future+Electronics; ComponentLink12Description: http://www.epcos.com/inf/70/db/var_08/SIOV_Leaded_StandarD.pdf?src-supplier=Future+Electronics; ComponentLink13URL: http://datasheet.octopart.com/B72210S2271K101-EPCOS-datasheet-11546246.pdf?src-supplier=Verical; ComponentLink13Description: http://datasheet.octopart.com/B72210S2271K101-EPCOS-datasheet-11546246.pdf?src-supplier=Verical; ComponentLink14URL: http://datasheet.octopart.com/B72210S2271K101-EPCOS-datasheet-11546246.pdf?src-supplier=TME; ComponentLink14Description: http://datasheet.octopart.com/B72210S2271K101-EPCOS-datasheet-11546246.pdf?src-supplier=TME; ComponentLink15URL: http://datasheet.octopart.com/B72210S2271K101-EPCOS-datasheet-11546246.pdf?src-supplier=TTI; ComponentLink15Description: http://datasheet.octopart.com/B72210S2271K101-EPCOS-datasheet-11546246.pdf?src-supplier=TTI; ComponentLink16URL: http://datasheet.octopart.com/B72210S2271K101-EPCOS-datasheet-11546246.pdf?src-supplier=Rutronik; ComponentLink16Description: http://datasheet.octopart.com/B72210S2271K101-EPCOS-datasheet-11546246.pdf?src-supplier=Rutronik
footprint B72210S2271K101
pins: 1, 2

## B72220S2271K101
designator VR?
VARISTOR 430V 10KA DISC 20MM; Manufacturer: TDK EPCOS; Manufacturer Part Number: B72220S2271K101; Item Type: Varistors; Value: 630pF; Max Output current: 8kA; Voltage Rating: 350V; Number of Circuits: 1; Max Voltage Rating (AC): 275V; Energy: 215J; Min Varistor Voltage: 387V; Max Varistor Voltage: 473V; Lead/Base Style: Radial; Clamping Current: 100A; Clamping Voltage: 710V; Voltage Tolerance: 10%; Power Rating: 1W; Supplier: Digikey; LCSC Part Number: C210767; RoHS: Yes; Stock: 13458; Pricing: 1=1.43, 10=0.901, 25=0.7632, 100=0.6065, 250=0.53008, 500=0.4833, 1000=0.44435, 2500=0.40274, 5000=0.37737 (USD); Mounting Technology: Through Hole; Case/Package: Metal; Material: 4240ConductorMaterial; Weight: 4.000004g; Min Operating Temperature: -40°C; Max Operating Temperature: 85°C; Packaging: Bulk; Max Voltage Rating (DC): 350V; Varistor Voltage: 430V; Max Surge Current: 10kA; Series: AdvanceD; Voltage Rating (AC): 275V; Voltage Rating (DC): 350V; Termination: 4745ConnectorType; Lead Pitch: 10mm; Depth: 5.8mm; Radiation Hardening: 5898YesNo; RoHS Compliant: Yes; Reach SVHC Compliant: Unknown; Flammability Rating: 5813Flammability; Lead Free: 5697LeadFree; ComponentLink1URL: https://datasheet.ciiva.com/28408/1680955-28408747.pdf?src-supplier=Element14; ComponentLink1Description: https://datasheet.ciiva.com/28408/1680955-28408747.pdf?src-supplier=Element14; ComponentLink2URL: https://datasheet.ciiva.com/16417/siov-leaded-advanced-16417989.pdf?src-supplier=Future+Electronics; ComponentLink2Description: https://datasheet.ciiva.com/16417/siov-leaded-advanced-16417989.pdf?src-supplier=Future+Electronics
footprint B72220S2271K101
pins: 1, 2

## BVR-Z-R0002-1.0
designator R?, comment 0.2mR
RESISTOR - ISA-WELD SHUNT, 0.000; Manufacturer: Isabellenhütte; Manufacturer Part Number: BVR-Z-R0002-1.0; Supplier: Digikey; Supplier Part Number: 4423-BVR-Z-R0002-1.0CT-ND; RoHS: Yes; Item Type: RESISTOR; Stock: 3918; Pricing: 1=5.08, 10=3.052, 25=2.5316, 50=2.2122, 100=1.9452, 250=1.65756, 500=1.5125 (USD)
footprint BVR-Z-R0002-1.0
pins: 1, 2, 3, 4

## CAY16-2201F4LF
designator R?, comment 2.2K
RES ARRAY 4 RES 2.2K OHM 1206; Manufacturer: Bourns; Manufacturer Part Number: CAY16-2201F4LF; Item Type: Resistor Arrays; Voltage Rating (DC): 50V; Number of Circuits: 4NUMBER; Supplier: Digikey; Supplier Part Number: CAY16-2201F4LFCT-ND; RoHS: Yes; Stock: 38963; Pricing: 1=0.1, 10=0.054, 25=0.0424, 50=0.0358, 100=0.0304, 250=0.02456, 500=0.02102, 1000=0.01809 (USD); Lead Free: 5697LeadFree; ComponentLink1URL: https://datasheet.ciiva.com/11807/0900766b8064e462-11807027.pdf?src-supplier=Rs; ComponentLink1Description: https://datasheet.ciiva.com/11807/0900766b8064e462-11807027.pdf?src-supplier=Rs; ComponentLink2URL: https://datasheet.ciiva.com/30021/catcay-30021357.pdf?src-supplier=Avnet; ComponentLink2Description: https://datasheet.ciiva.com/30021/catcay-30021357.pdf?src-supplier=Avnet; ComponentLink3URL: https://datasheet.ciiva.com/1478/1849489-1478846.pdf?src-supplier=Element14; ComponentLink3Description: https://datasheet.ciiva.com/1478/1849489-1478846.pdf?src-supplier=Element14; ComponentLink4URL: https://datasheet.ciiva.com/1478/1849489-1478847.pdf?src-supplier=Element14; ComponentLink4Description: https://datasheet.ciiva.com/1478/1849489-1478847.pdf?src-supplier=Element14; ComponentLink5URL: https://datasheet.ciiva.com/6533/catcay-6533677.pdf?src-supplier=Digikey; ComponentLink5Description: https://datasheet.ciiva.com/6533/catcay-6533677.pdf?src-supplier=Digikey; ComponentLink6URL: https://datasheet.ciiva.com/6533/catcay-6533678.pdf?src-supplier=Digikey; ComponentLink6Description: https://datasheet.ciiva.com/6533/catcay-6533678.pdf?src-supplier=Digikey; ComponentLink7URL: https://datasheet.ciiva.com/6533/catcay-6533679.pdf?src-supplier=Digikey; ComponentLink7Description: https://datasheet.ciiva.com/6533/catcay-6533679.pdf?src-supplier=Digikey; ComponentLink8URL: https://datasheet.ciiva.com/48692/001055385-da-01-en-wid-arr-cay16-2201f4lf-2-2k-ohm-4-w-1206-48692149.pdf?src-supplier=Conrad; ComponentLink8Description: https://datasheet.ciiva.com/48692/001055385-da-01-en-wid-arr-cay16-2201f4lf-2-2k-ohm-4-w-1206-48692149.pdf?src-supplier=Conrad
footprint CAY16-2201F4LF
pins: 1, 2, 3, 4, 5, 6, 7, 8

## CHV2010-JW-475ELF
designator R?, comment 4.7M
RES SMD 4.7M OHM 5% 1/2W 2010; Manufacturer: Bourns; Manufacturer Part Number: CHV2010-JW-475ELF; Item Type: Resistors; Max Power Dissipation: 500mW; Value: 4.7MΩ; Temperature Coefficient: 200ppm/°C; Voltage Rating: 3kV; Working Voltage: 2kV; Supplier: Avnet; Supplier Part Number: 42Y0175; RoHS: Compliant; Stock: 3; Pricing: 1=0.303, 30=0.275, 50=0.245, 100=0.217 (USD); Case/Package: 2010; Case Code (Imperial): 2010; Case Code (Metric): 5025; China RoHS: Non-Compliant; Composition: Thick Film; Depth: 2.5mm; Height: 600µm; Length: 5.0038mm; Lifecycle Status: Production; Max Operating Temperature: 155°C; Min Operating Temperature: -55°C; Mounting Technology: Surface Mount; Number of Terminals: 2; Number of Terminations: 2; Power Dissipation: 500mW; Power Rating: 500mW; REACH SVHC: Yes; Termination: SMD/SMT; Tolerance: 5%; Voltage Rating (DC): 3kV; Width: 2.5mm; ComponentLink1URL: https://datasheet.octopart.com:443/CHV2010-JW-475ELF-Bourns-datasheet-163669586.pdf?src-supplier=IHS; ComponentLink1Description: https://datasheet.octopart.com:443/CHV2010-JW-475ELF-Bourns-datasheet-163669586.pdf?src-supplier=IHS; ComponentLink2URL: https://datasheet.octopart.com:443/CHV2010-JW-475ELF-Bourns-datasheet-62338461.pdf?src-supplier=Newark; ComponentLink2Description: https://datasheet.octopart.com:443/CHV2010-JW-475ELF-Bourns-datasheet-62338461.pdf?src-supplier=Newark; ComponentLink3URL: https://datasheet.octopart.com:443/CHV2010-JW-475ELF-Bourns-datasheet-38535537.pdf?src-supplier=Newark; ComponentLink3Description: https://datasheet.octopart.com:443/CHV2010-JW-475ELF-Bourns-datasheet-38535537.pdf?src-supplier=Newark; ComponentLink4URL: https://datasheet.octopart.com:443/CHV2010-JW-475ELF-Bourns-datasheet-177039210.pdf?src-supplier=Burklin+Elektronik; ComponentLink4Description: https://datasheet.octopart.com:443/CHV2010-JW-475ELF-Bourns-datasheet-177039210.pdf?src-supplier=Burklin+Elektronik; ComponentLink5URL: https://datasheet.octopart.com:443/CHV2010-JW-475ELF-Bourns-datasheet-38266327.pdf?src-supplier=RS+(Formerly+Allied+Electronics); ComponentLink5Description: https://datasheet.octopart.com:443/CHV2010-JW-475ELF-Bourns-datasheet-38266327.pdf?src-supplier=RS+(Formerly+Allied+Electronics); ComponentLink6URL: http://sigma.octopart.com:80/conflict_mineral_statement/Bourns-company-36.pdf?src-supplier=Compliance+Statements; ComponentLink6Description: http://sigma.octopart.com:80/conflict_mineral_statement/Bourns-company-36.pdf?src-supplier=Compliance+Statements
footprint RES-2010
pins: 1, 2

## CN24JTN331
designator R?, comment 330R
4 8 ±5% 330Ω 62.5mW ±250ppm/℃ 0402x4 Resistor Networks & Arrays ROHS; Manufacturer: TA-I Tech; Manufacturer Part Number: CN24JTN331; Item Type: Resistor Array; Package: 0402x4; LCSC Part Number: C162973; ComponentLink1Description: LCSC; ComponentLink1URL: https://www.lcsc.com/product-detail/span-style-background-color-ff0-Resistor-span-Networks-Arrays_TA-I-Tech-CN24JTN331_C162973.html
footprint Res-0402x4
pins: 1, 2, 3, 4, 5, 6, 7, 8

## CPF0603B15KE1
designator R?
Res Thin Film 0603 15K Ohm 0.1% 0.063W(1/16W) ±25ppm/C Pad SMD T/R; Manufacturer: TE Connectivity Neohm; Manufacturer Part Number: CPF0603B15KE1; Voltage Rating: 50V; Number of Resistors: 1; Voltage Rating (DC): 120V; Value: 15kR; Power Rating: 63mW; Temperature Coefficient: 25ppm/°C; Supplier: Digikey; Supplier Part Number: A103258CT-ND; RoHS: Yes; Category: Chip SMD Resistors; Stock: 29093; Pricing: 1=0.39, 10=0.285, 50=0.2196, 100=0.1951, 500=0.14598 (USD); Mounting Technology: Surface Mount; Case/Package: 0603; Pins: 2; Weight: 7.1E-05oz; Case Code (Imperial): 0603; Case Code (Metric): 1608; Min Operating Temperature: -55°C; Max Operating Temperature: 155°C; Termination: Solder; Operating Supply Voltage: 50V; Tolerance: 0.1%; Resistor Type: Thin Film; Packaging: Tape and Reel; Package Quantity: 1000; Number of Terminations: 2; Series: CPF; Max Power Dissipation: 63mW; Resistance Tolerance: 0.1%; Length: 1.55mm; Width: 0.8mm; Height: 0.45mm; Depth: 800um; Radiation Hardening: 5898YesNo; ELV: 5681ELVCompliant; Reach SVHC Compliant: No; Lead Free: 5697LeadFree; RoHS Compliant: Yes; Military Standard: 4991MilitaryStandard; ComponentLink1URL: https://datasheet.ciiva.com/12795/eng-ds-1773200-i-12795533.pdf?src-supplier=Mouser; ComponentLink1Description: https://datasheet.ciiva.com/12795/eng-ds-1773200-i-12795533.pdf?src-supplier=Mouser
footprint Res-0603
pins: 1, 2

## CPF0603B18KE1
designator R?
Res Thin Film 0603 18K Ohm 0.1% 0.063W(1/16W) ±25ppm/C Pad SMD T/R; Manufacturer: TE Connectivity Neohm; Manufacturer Part Number: CPF0603B18KE1; Supplier: Digikey; Supplier Part Number: A103052DKR-ND; RoHS: Yes; Category: Chip SMD Resistors; Stock: 10956; Pricing: 1=0.4, 10=0.291, 50=0.2244, 100=0.1993, 500=0.14912 (USD); ComponentLink1URL: https://datasheet.ciiva.com/7789/eng-ds-1773200-j-7789479.pdf?src-supplier=Element14; ComponentLink1Description: https://datasheet.ciiva.com/7789/eng-ds-1773200-j-7789479.pdf?src-supplier=Element14; ComponentLink2URL: https://datasheet.ciiva.com/7789/eng-ds-1773200-j-7789480.pdf?src-supplier=Element14; ComponentLink2Description: https://datasheet.ciiva.com/7789/eng-ds-1773200-j-7789480.pdf?src-supplier=Element14
footprint Res-0603
pins: 1, 2

## CPF0603B30KE1
designator R?
Res Thin Film 0603 30K Ohm 0.1% 0.063W(1/16W) ±25ppm/C Epoxy Pad SMD Medical T/R; Manufacturer: TE Connectivity; Manufacturer Part Number: CPF0603B30KE1; Operating Supply Voltage: 50V; Supplier: Digikey; Supplier Part Number: A103082CT-ND; RoHS: Yes; Category: Chip SMD Resistors; Stock: 3038; Pricing: 1=0.42, 10=0.299, 50=0.2326, 100=0.2077, 500=0.15724 (USD); Voltage Rating (DC): 50V; ELV: 5681ELVCompliant; ComponentLink1URL: https://datasheet.ciiva.com/22670/1723857-22670797.pdf?src-supplier=Element14; ComponentLink1Description: https://datasheet.ciiva.com/22670/1723857-22670797.pdf?src-supplier=Element14; ComponentLink2URL: https://datasheet.ciiva.com/28584/1723857-28584543.pdf?src-supplier=Element14; ComponentLink2Description: https://datasheet.ciiva.com/28584/1723857-28584543.pdf?src-supplier=Element14
footprint Res-0603
pins: 1, 2

## CPF0805B390RE1
designator R?, comment 390R
Res Thin Film 0805 390 Ohm 0.1% 1/10W ±25ppm/°C Molded SMD SMD Paper T/R; Manufacturer: TE Connectivity Neohm; Manufacturer Part Number: CPF0805B390RE1; Supplier: Digikey; Supplier Part Number: A103202CT-ND; RoHS: Yes; Category: Chip SMD Resistors; Stock: 3823; Pricing: 1=0.39, 10=0.283, 50=0.2188, 100=0.1943, 500=0.14536 (USD); ComponentLink1URL: https://datasheet.ciiva.com/7943/eng-ds-1773200-j-7943773.pdf?src-supplier=Element14; ComponentLink1Description: https://datasheet.ciiva.com/7943/eng-ds-1773200-j-7943773.pdf?src-supplier=Element14; ComponentLink2URL: https://datasheet.ciiva.com/7943/eng-ds-1773200-j-7943799.pdf?src-supplier=Element14; ComponentLink2Description: https://datasheet.ciiva.com/7943/eng-ds-1773200-j-7943799.pdf?src-supplier=Element14
footprint RES-0805 (SMD 0805)
pins: 1, 2

## CR0201FH1000G
designator R?, comment 100R
50mW ±1% 100Ω 0201 Chip Resistor - Surface Mount ROHS; Manufacturer: LIZ ELEC; Manufacturer Part Number: CR0201FH1000G; Package: 0201; LCSC Part Number: C3036998; Item Type: Resistor; ComponentLink1Description: LCSC; ComponentLink1URL: https://www.lcsc.com/product-detail/Chip-Resistor-Surface-Mount_LIZ-Elec-CR0201FH1000G_C3036998.html
footprint Res-0201
pins: 1, 2

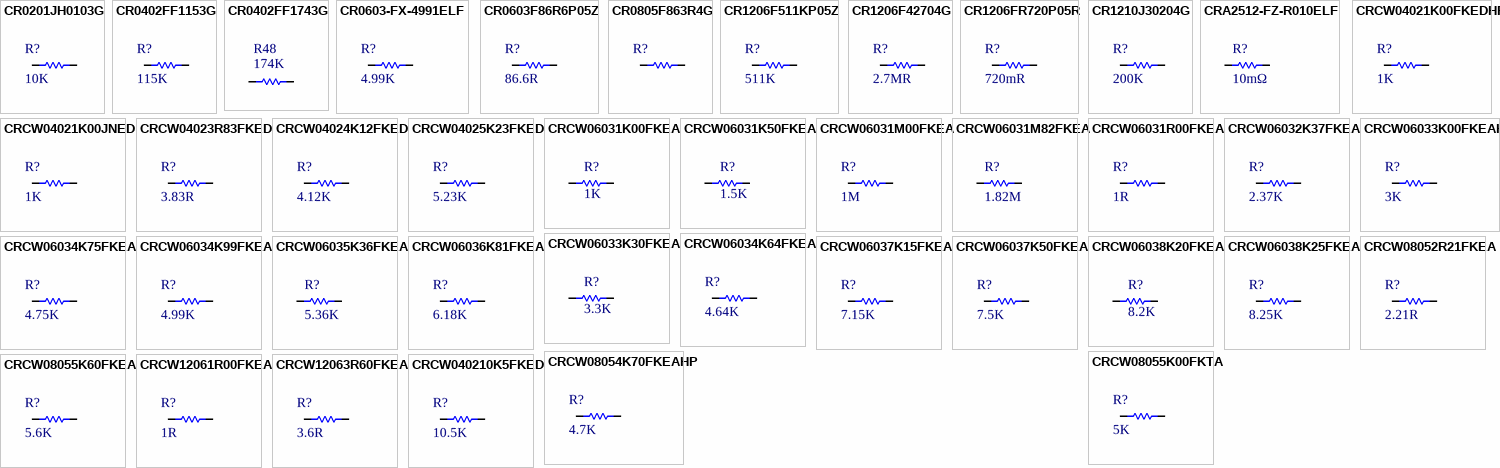
[diagram p5: symbols CR0201JH0103G to CRCW040210K5FKED]

## CR0201JH0103G
designator R?, comment 10K
50mW Thick Film Resistors ±5% ±250ppm/℃ 10kΩ 0201 Chip Resistor - Surface Mount ROHS; Manufacturer: LIZ ELEc; Manufacturer Part Number: CR0201JH0103G; Package: 0201; LCSC Part Number: C100151; Item Type: Resistor; ComponentLink1Description: LCSC; ComponentLink1URL: https://www.lcsc.com/product-detail/Chip-Resistor-Surface-Mount_LIZ-Elec-CR0201JH0103G_C100151.html
footprint Res-0201
pins: 1, 2

## CR0402FF1153G
designator R?, comment 115K
62.5mW Thick Film Resistors 50V ±1% ±200ppm/℃ 115kΩ 0402 Chip Resistor - Surface Mount ROHS; Manufacturer: LIZ Elec; Manufacturer Part Number: CR0402FF1153G; Package: 0402; LCSC Part Number: C100215; Item Type: Resistor; ComponentLink1Description: LCSC; ComponentLink1URL: https://www.lcsc.com/product-detail/Chip-Resistor-Surface-Mount_LIZ-Elec-CR0402FF1153G_C100215.html
footprint Res-0402
pins: 1, 2

## CR0402FF1743G
designator R48, comment 174K
62.5mW Thick Film Resistors 50V ±1% ±200ppm/℃ 174kΩ 0402 Chip Resistor - Surface Mount ROHS; Manufacturer: LIZ Elec; Manufacturer Part Number: CR0402FF1743G; Package: 0402; LCSC Part Number: C100271; Item Type: Resistor; ComponentLink1Description: JLCPCB; ComponentLink1URL: https://jlcpcb.com/kr/partdetail/LizElec-CR0402FF1743G/C100271
footprint Res-0402
pins: 1, 2